# Altium integrated library Ceramic Capacitor 10pF 0805.IntLib: 1 symbol
Pins are listed as number, name and electrical type; pins without a type are passive.

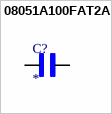
[diagram p0: symbol 08051A100FAT2A]

## 08051A100FAT2A
designator C?
0805 10 pF 100 V Â±1 % Tolerance C0G/NP0 SMT Multilayer Ceramic Capacitor; MF: AVX; MP: 08051A100FAT2A; SnapEDA_Link: https://www.snapeda.com/parts/08051A100FAT2A/AVX/view-part/?ref=snap; Package: 2012 AVX; Value: *; Check_prices: https://www.snapeda.com/parts/08051A100FAT2A/AVX/view-part/?ref=eda
footprint CAPC2012X94N
pins: 1, 2